# Altium footprint library Ether to laser.PcbLib: 23 footprints (part 2 of 2)
Each footprint in its own frame and in the unit in brackets; x right, y up, seen from the top. Pads: shape width x height; smd on the part's side, far side on the other; paste and mask are expansions set on the pad; w line width, h text height; cw(c..) or ccw(c..) is an arc to the next point about the centre after c.
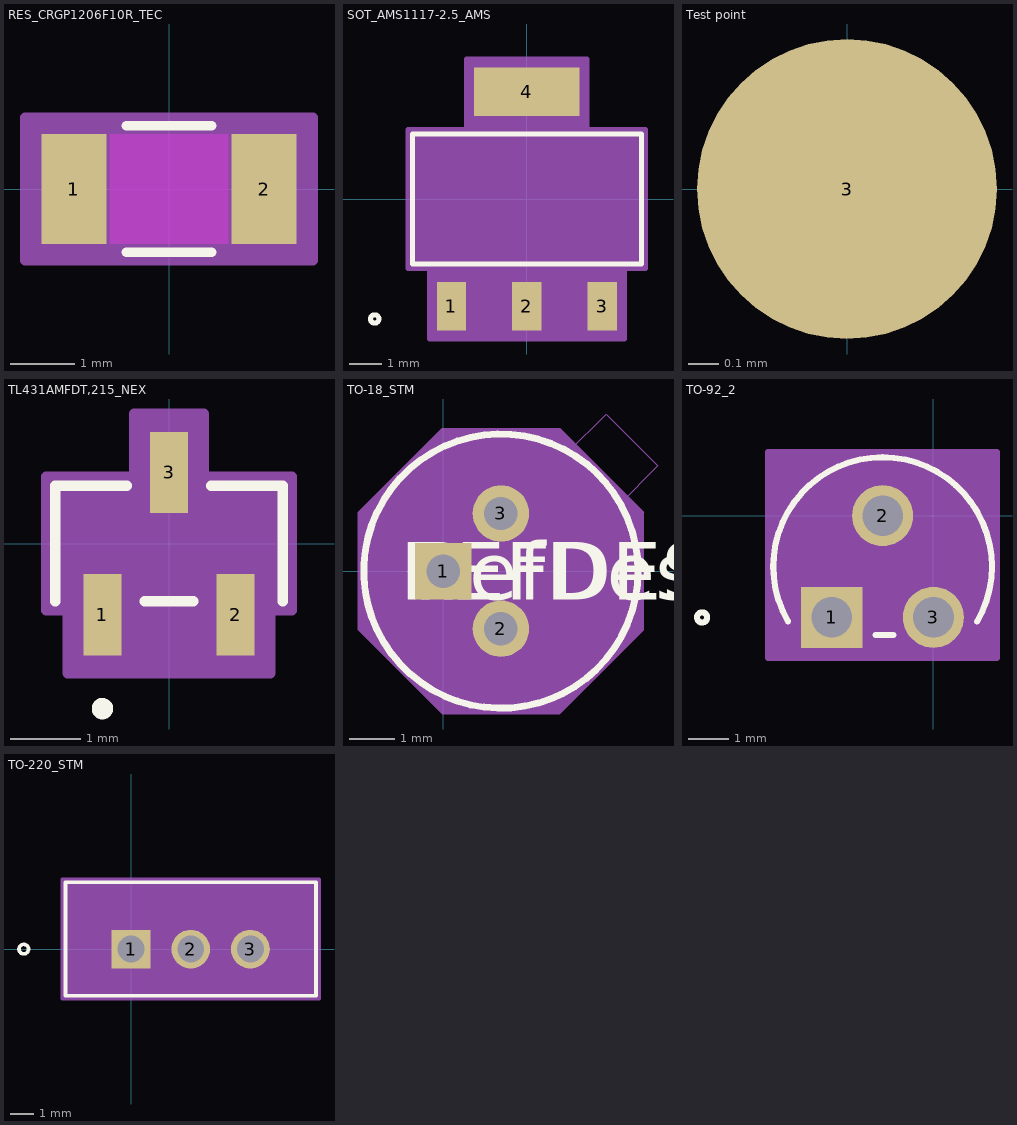
[diagram p1: the footprints below, top view; thin cyan lines are the x and y axes]

## RES_CRGP1206F10R_TEC [mil]
pads (2):
  rect 39.78x67 smd paste+0 mask+0: 1(-57.89,0) 2(57.89,0)
Top Layer keep-out:
  region: -36,-31.5 -36,31.5 36,31.5 36,-31.5
Top Overlay:
  lines w6: -25.89,-38.5 25.89,-38.5 ; -25.89,38.5 25.89,38.5
  text ".Designator" at -137.5,-25 h50
Keep-Out Layer:
  region: -36,-33.5 -36,33.5 36,33.5 36,-33.5
Mechanical 13:
  lines w1: -64,-33.5 -64,33.5 ; -64,-33.5 64,-33.5 ; -64,-33.5 -38,-33.5 -38,33.5 -64,33.5 ; -64,-33.5 -64,33.5 ; -64,33.5 64,33.5 ; 64,-33.5 64,33.5 ; 64,-33.5 64,33.5 ; 64,-33.5 38,-33.5 38,33.5 64,33.5
Mechanical 15:
  region: 87.78,-43.5 -87.78,-43.5 -87.78,43.5 87.78,43.5
  lines w6: -87.78,-43.5 87.78,-43.5 87.78,43.5 -87.78,43.5 -87.78,-43.5
3D body "RES_CRGP1206F10R_TEC.step": height 25.98, standoff 0, extent -64.02,-33.5 64.02,33.5

## SOT_AMS1117-2.5_AMS [mil]
pads (4):
  rect 35x58 smd paste+0 mask+0: 1(-90.16,-128.5) 2(0,-128.5) 3(90.16,-128.5)
  rect 126x58 smd paste+0 mask+0: 4(0,128.5)
Top Overlay:
  circle w6: c-182,-143.5 r5
  lines w6: -137,-78 137,-78 137,78 -137,78 -137,-78
  text ".Designator" at -137.5,-25 h50
Mechanical 13:
  circle w1: c-122,-63 r5
  lines w1: -132,-73 132,-73 132,73 -132,73 -132,-73 ; -106.66,-143.5 -106.66,-73 -73.66,-73 -73.66,-143.5 -106.66,-143.5 ; -62,73 62,73 62,143.5 -62,143.5 -62,73 ; -16.5,-143.5 -16.5,-73 16.5,-73 16.5,-143.5 -16.5,-143.5 ; 73.66,-143.5 73.66,-73 106.66,-73 106.66,-143.5 73.66,-143.5
  text ".Designator" at -137.5,-25 h50
Mechanical 15:
  region: -142,-83 -142,83 -72,83 -72,167.5 72,167.5 72,83 142,83 142,-83 116.66,-83 116.66,-167.5 -116.66,-167.5 -116.66,-83
  lines w6: -142,-83 -142,83 -72,83 -72,167.5 72,167.5 72,83 142,83 142,-83 116.66,-83 116.66,-167.5 -116.66,-167.5 -116.66,-83 -142,-83
3D body "SOT_AMS1117-25_AMS.step": height 71.1, standoff 0, extent -132.01,-143.5 132.01,143.5

## Test point [mm]
pads (1):
  round 1 all layers, no hole mask+0: 3(0,0)

## TL431AMFDT,215_NEX [mil]
pads (3):
  rect 21.36x45.56 smd paste+0 mask+0: 1(-37.4,-40) 2(37.4,-40) 3(0,40)
Top Overlay:
  circle w6: c-37.4,-92.78 r3
  lines w6: -64,-32.5 -64,32.5 -23.78,32.5 ; -13.62,-32.5 13.62,-32.5 ; 23.78,32.5 64,32.5 64,-32.5
Mechanical 13:
  circle w0: c-37.4,-17.5 r3
  lines w1: -59,-27.5 59,-27.5 59,27.5 -59,27.5 -59,-27.5 ; -46.9,-49 -46.9,-27.5 -27.9,-27.5 -27.9,-49 -46.9,-49 ; -9.5,27.5 9.5,27.5 9.5,49 -9.5,49 -9.5,27.5 ; 27.9,-49 27.9,-27.5 46.9,-27.5 46.9,-49 27.9,-49
Mechanical 15:
  region: -69,-37.5 -69,37.5 -19.5,37.5 -19.5,72.78 19.5,72.78 19.5,37.5 69,37.5 69,-37.5 56.9,-37.5 56.9,-72.78 -56.9,-72.78 -56.9,-37.5
  lines w6: -69,-37.5 -69,37.5 -19.5,37.5 -19.5,72.78 19.5,72.78 19.5,37.5 69,37.5 69,-37.5 56.9,-37.5 56.9,-72.78 -56.9,-72.78 -56.9,-37.5 -69,-37.5
3D body "TL431AMFDT215_NEX.step": height 43.11, standoff 0, extent -59.02,-49.02 59.02,49.02

## TO-18_STM [mil]
pads (3):
  rect 49x49 / inner round 60 / far side rect 49x49 hole 29 paste-99999 mask+0: 1(0,0)
  round 49 / inner round 60 / far side round 49 hole 29 paste-99999 mask+0: 2(50,-50) 3(50,50)
Top Overlay:
  circle w6: c50,0 r119
  text "REFDES" at -37.5,-25 h50
  text "RefDes" at -25,-25 h50
Mechanical 13:
  circle w0: c50,0 r114
  lines w1: 108.11,103.11 141.34,136.34 186.34,91.34 153.11,58.11
  text "RefDes2" at -37.5,-25 h50
Mechanical 15:
  region: -74,51.06 -1.06,124 101.06,124 174,51.06 174,-51.06 101.06,-124 -1.06,-124 -74,-51.06
  lines w1: -74,-51.06 -74,51.06 -1.06,124 101.06,124 174,51.06 174,-51.06 101.06,-124 -1.06,-124 -74,-51.06
3D body "2N2222.stp": height 322.83, standoff -413.39, extent -103.02,-153.02 216.44,166.44

## TO-92_2 [mil]
pads (3):
  rect 60x60 hole 40 paste-99999 mask-30: 1(-100,-100)
  round 60 hole 40 paste-99999 mask-30: 2(-50,0) 3(0,-100)
Top Overlay:
  circle w6: c-227.5,-100 r5
  lines w6: -143.1,-103.75 cw(c-50,-50) 57.5,-50 cw(c-50,-50) 42.91,-104.08 ; -56.9,-117.5 -39.39,-117.5
  text ".Designator" at -187.5,-75 h50
Mechanical 13:
  circle w1: c-142.5,-100 r5
  lines w1: -131.24,-112.5 cw(c-50,-50) 31.24,-112.5 -131.24,-112.5
  lines w6: -110,-100 -90,-100 ; -100,-110 -100,-90
  text ".Designator" at -187.5,-75 h50
Mechanical 15:
  region: 62.5,-140 -162.5,-140 -162.5,62.5 62.5,62.5
  lines w6: -162.5,-140 62.5,-140 62.5,62.5 -162.5,62.5 -162.5,-140
3D body "TO-92_2.step": height 360, standoff -70, extent -154.77,-115 50,52.04

## TO-220_STM [mil]
pads (3):
  rect 65x65 / inner round 60 / far side rect 65x65 hole 45 paste-99999 mask-32.5: 1(0,0)
  round 65 / inner round 60 / far side round 65 hole 45 paste-99999 mask-32.5: 2(100,0) 3(200,0)
Top Overlay:
  circle w6: c-180,0 r8
  lines w6: -110,-78.5 310,-78.5 310,112.5 -110,112.5 -110,-78.5
Mechanical 13:
  circle w0: c-85,0 r8
  lines w1: -105,-73.5 305,-73.5 305,107.5 -105,107.5 -105,-73.5
  lines w6: -10,0 10,0 ; 0,-10 0,10
Mechanical 15:
  region: 315,-83.5 -115,-83.5 -115,117.5 315,117.5
  lines w6: -115,-83.5 -115,117.5 315,117.5 315,-83.5 -115,-83.5
3D body "TO-220_STM.step": height 894.09, standoff -136.89, extent -105,-66.02 305,115